# Altium footprint library Robert_.PcbLib: 95 footprints (part 2 of 6)
Each footprint in its own frame and in the unit in brackets; x right, y up, seen from the top. Pads: shape width x height; smd on the part's side, far side on the other; paste and mask are expansions set on the pad; w line width, h text height; cw(c..) or ccw(c..) is an arc to the next point about the centre after c.
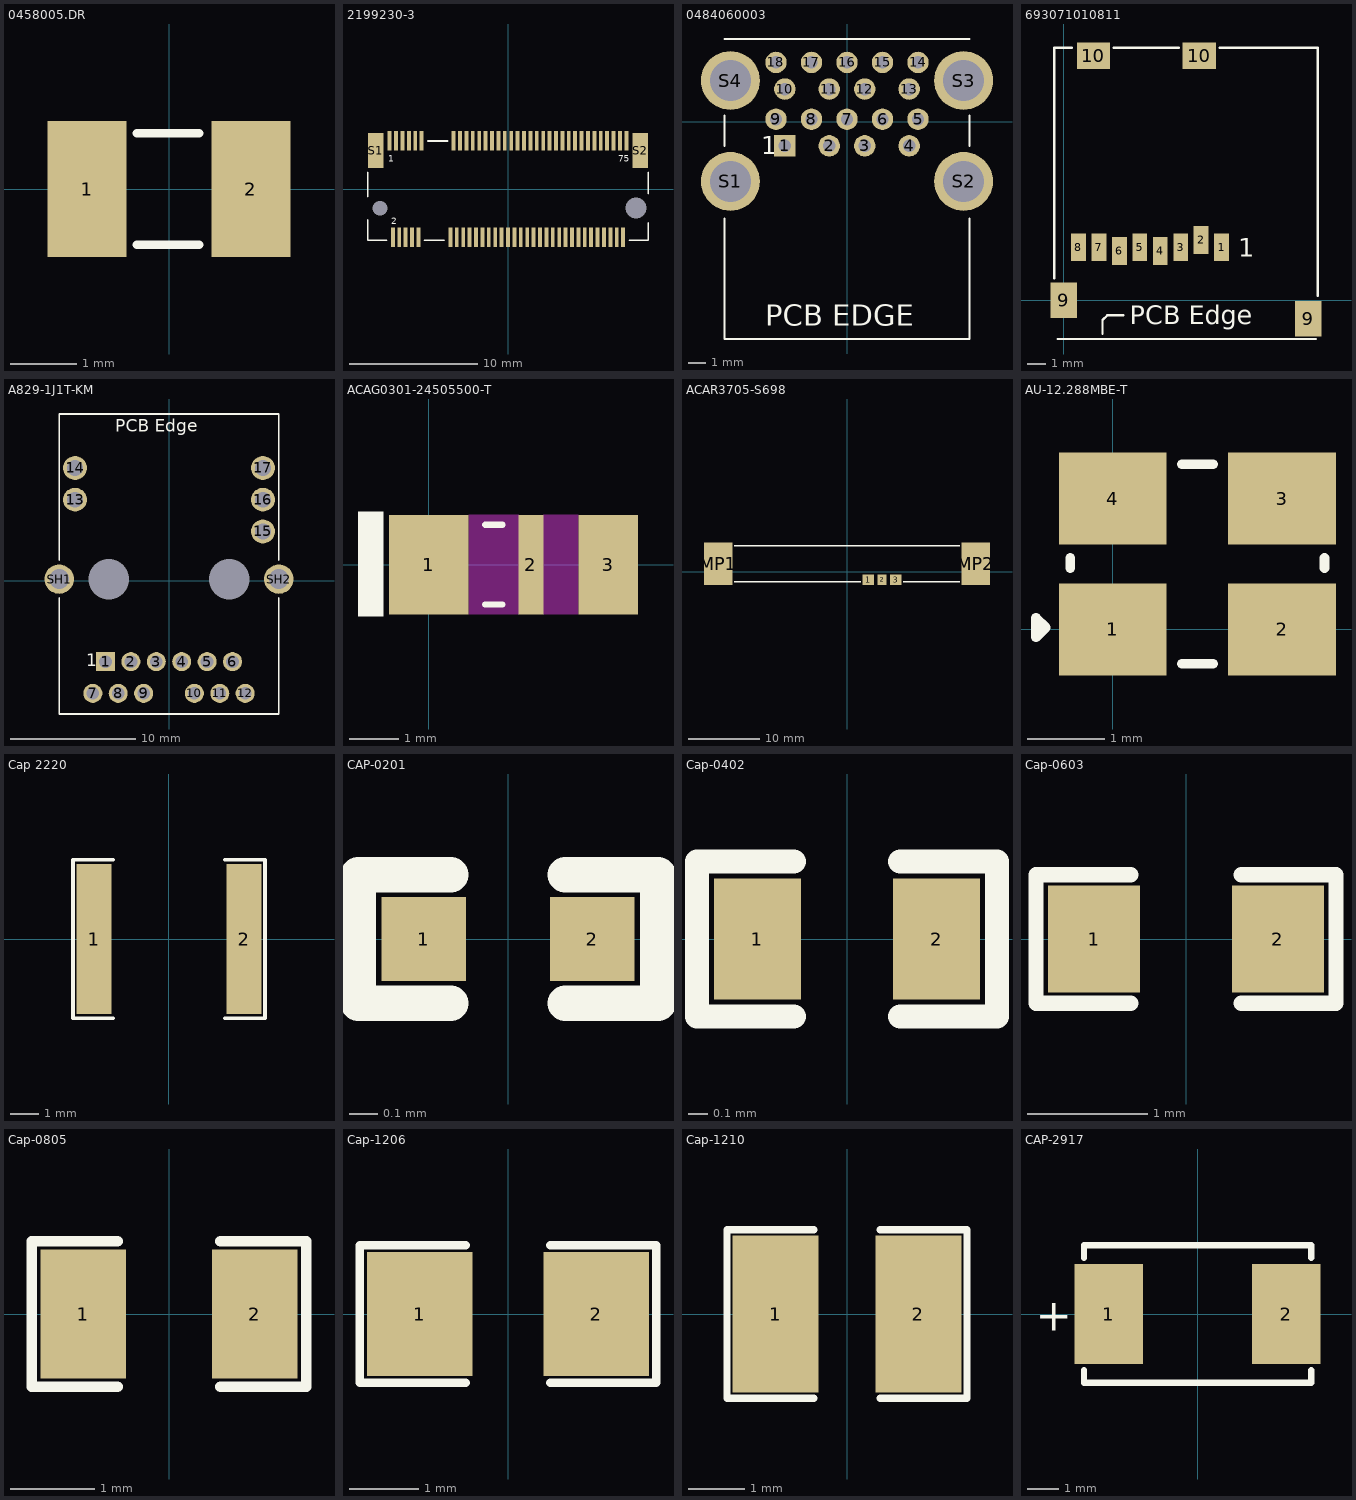
[diagram p1: the footprints below, top view; thin cyan lines are the x and y axes]

## 0458005.DR [mm]
pads (2):
  rect 1.185x2.05 smd: 1(-1.232,0) 2(1.232,0)
Top Overlay:
  lines w0.127: -0.483,-0.838 0.457,-0.838 ; -0.483,0.838 0.457,0.838
3D body "0458Series_LTF.step": height 1.58, standoff 0, extent -1.588,-0.787 1.588,0.787

## 2199230-3 [mm]
pads (71):
  rect 0.3x1.55 smd: 1(-9.25,3.775) 2(-9,-3.775) 3(-8.75,3.775) 4(-8.5,-3.775) 5(-8.25,3.775) 6(-8,-3.775) 7(-7.75,3.775) 8(-7.5,-3.775) 9(-7.25,3.775) 10(-7,-3.775) 11(-6.75,3.775) 20(-4.5,-3.775) 21(-4.25,3.775) 22(-4,-3.775) 23(-3.75,3.775) 24(-3.5,-3.775) 25(-3.25,3.775) 26(-3,-3.775) 27(-2.75,3.775) 28(-2.5,-3.775) 29(-2.25,3.775) 30(-2,-3.775) 31(-1.75,3.775) 32(-1.5,-3.775) 33(-1.25,3.775) 34(-1,-3.775) 35(-0.75,3.775) 36(-0.5,-3.775) 37(-0.25,3.775) 38(0,-3.775) 39(0.25,3.775) 40(0.5,-3.775) 41(0.75,3.775) 42(1,-3.775) 43(1.25,3.775) 44(1.5,-3.775) 45(1.75,3.775) 46(2,-3.775) 47(2.25,3.775) 48(2.5,-3.775) 49(2.75,3.775) 50(3,-3.775) 51(3.25,3.775) 52(3.5,-3.775) 53(3.75,3.775) 54(4,-3.775) 55(4.25,3.775) 56(4.5,-3.775) 57(4.75,3.775) 58(5,-3.775) 59(5.25,3.775) 60(5.5,-3.775) 61(5.75,3.775) 62(6,-3.775) 63(6.25,3.775) 64(6.5,-3.775) 65(6.75,3.775) 66(7,-3.775) 67(7.25,3.775) 68(7.5,-3.775) 69(7.75,3.775) 70(8,-3.775) 71(8.25,3.775) 72(8.5,-3.775) 73(8.75,3.775) 74(9,-3.775) 75(9.25,3.775)
  rect 1.2x2.75 smd: S1(-10.35,3) S2(10.35,3)
  round 0 hole 1.15 unplated: ""(-10,-1.5)
  round 0 hole 1.65 unplated: ""(10,-1.5)
Top Overlay:
  lines w0.127: -10.95,-2.395 -10.95,-4 -9.47,-4 ; -10.95,-0.605 -10.95,1.305 ; -6.53,-4 -4.97,-4 ; -6.28,3.75 -4.72,3.75 ; 9.47,-4 10.95,-4 10.95,-2.645 ; 10.95,-0.355 10.95,1.305
  text "75" at 8.611,2.134 h0.5
  text "2" at -9.119,-2.769 h0.5
  text "1" at -9.347,2.134 h0.5
3D body "2199230-3.stp": height 4.09, standoff -0.62, extent -10.95,-4.338 10.95,4.362

## 0484060003 [mm]
pads (22):
  rect 1.208x1.208 hole 0.7: 1(-3.5,-1.35)
  round 1.208 hole 0.7: 2(-1,-1.35) 3(1,-1.35) 4(3.5,-1.35) 5(4,0.15) 6(2,0.15) 7(0,0.15) 8(-2,0.15) 9(-4,0.15) 10(-3.5,1.85) 11(-1,1.85) 12(1,1.85) 13(3.5,1.85) 14(4,3.35) 15(2,3.35) 16(0,3.35) 17(-2,3.35) 18(-4,3.35)
  round 3.316 hole 2.3: S1(-6.57,-3.35) S2(6.57,-3.35) S3(6.57,2.33) S4(-6.57,2.33)
Top Overlay:
  lines w0.127: -6.9,-5.45 -6.9,-12.231 6.9,-12.231 6.9,-5.45 ; -6.9,-1.35 -6.9,0.35 ; -6.9,4.67 6.9,4.67 ; 6.9,-1.35 6.9,0.35
  text "1" at -4.828,-1.831 h1
  text "PCB EDGE" at -4.599,-11.471 h1.2
3D body "484060003.stp": height 16.2, standoff -3.2, extent -7.847,-12.794 7.823,4.666

## 693071010811 [mm]
pads (12):
  rect 0.8x1.5 smd: 1(8.49,2.85) 2(7.39,3.25) 3(6.29,2.85) 4(5.19,2.65) 5(4.09,2.85) 6(2.99,2.65) 7(1.89,2.85) 8(0.79,2.85)
  rect 1.4x1.9 smd: 9(0,0) 9(13.15,-1)
  rect 1.8x1.4 smd: 10(1.6,13.15) 10(7.3,13.15)
Top Overlay:
  lines w0.127: -0.508,1.194 -0.508,13.589 0.432,13.589 ; -0.33,-2.083 13.564,-2.083 ; 2.083,-1.803 2.083,-1.067 2.337,-0.813 3.2,-0.813 ; 2.692,13.589 6.198,13.589 ; 8.382,13.589 13.665,13.589 13.665,0.229
  text "1" at 9.373,2.337 h1
  text "PCB Edge" at 3.556,-1.292 h1
3D body "693071010811.stp": height 2.2, standoff 0, extent -0.464,-1.722 13.636,13.528

## A829-1J1T-KM [mil]
pads (21):
  rect 60x60 hole 40: 1(-200,-255)
  round 60 hole 40: 2(-120,-255) 3(-40,-255) 4(40,-255) 5(120,-255) 6(200,-255) 7(-240,-355) 8(-160,-355) 9(-80,-355) 10(80,-355) 11(160,-355) 12(240,-355)
  round 75 hole 50: 13(-296,255) 14(-296,355) 15(296,155) 16(296,255) 17(296,355)
  round 93 hole 62: SH1(-346,5) SH2(346,5)
  round 0 hole 128 unplated: ""(-190,5) ""(190,5)
Top Overlay:
  lines w5: -346,-54.45 -346,-420 346,-420 346,-54.45 ; -346,64.45 -346,525 346,525 346,64.45
  text "1" at -261,-269 h39.37
  text "PCB Edge" at -169,469.12 h39.37
3D body "A829-1J1T-KM--3DModel-STEP-56544.STEP": height 503.29, standoff -141.47, extent -401,-420.5 400.89,524.5

## ACAG0301-24505500-T [mm]
pads (3):
  rect 1.6x2 smd: 1(0,0)
  rect 0.5x2 smd: 2(2.05,0)
  rect 1.2x2 smd: 3(3.6,0)
Top Overlay:
  rectangle: -1.422,-1.041 -0.914,1.067
  lines w0.127: 1.13,-0.8 1.48,-0.8 ; 1.13,0.8 1.48,0.8
Keep-Out Layer:
  region: 3,-1 2.3,-1 2.3,1 3,1
  region: 1.8,-1 0.8,-1 0.8,1 1.8,1
3D body "step_temp.STEP": height 1.2, standoff 0, extent 0.3,-0.8 3.5,0.8

## ACAR3705-S698 [mm]
pads (5):
  rect 1.65x1.5 smd: 1(2.975,-1.125) 3(6.825,-1.125)
  rect 1.2x1.5 smd: 2(4.9,-1.125)
  rect 4x6 smd: MP1(-18,1.125) MP2(18,1.125)
Top Overlay:
  lines w0.2: -15.8,-1.375 1.9,-1.375 ; -15.8,3.625 15.8,3.625 ; 7.9,-1.375 15.8,-1.375
3D body "ACAR3705-S698.STEP": height 5, standoff 0, extent -18.5,-1.372 18.5,3.628

## AU-12.288MBE-T [mm]
pads (4):
  rect 1.4x1.2 smd: 1(0,0) 2(2.2,0) 3(2.2,1.7) 4(0,1.7)
Top Overlay:
  lines w0.127: -0.551,0.799 -0.551,0.926 ; 0.897,-0.445 1.303,-0.445 ; 0.897,2.145 1.303,2.145 ; 2.751,0.799 2.751,0.926 ; -0.995,-0.103 -0.868,0.024 -0.995,0.151 -0.995,-0.103
3D body "User Library-Crystal_ECX-32.STEP": height 0.82, standoff 0, extent -0.5,-0.4 2.7,2.1

## Cap 2220 [mm]
pads (2):
  rect 1.2x5.2 smd: 1(-2.6,0) 2(2.6,0)
Top Overlay:
  lines w0.127: -1.93,-2.749 -3.327,-2.749 -3.327,2.749 -1.93,2.749 ; 1.93,-2.749 3.327,-2.749 3.327,2.749 1.93,2.749
3D body "CAP2220.stp": height 2.24, standoff -0.04, extent -2.85,-2.5 2.85,2.5

## CAP-0201 [mm]
pads (2):
  rect 0.3x0.3 smd mask+0.055: 1(-0.3,0) 2(0.3,0)
Top Overlay:
  lines w0.127: -0.203,-0.229 -0.533,-0.229 -0.533,0.229 -0.203,0.229 ; 0.203,-0.229 0.533,-0.229 0.533,0.229 0.203,0.229
3D body "User Library-SMD Ceramic Capacitors_0201 (0603)_AB.STEP": height 0.28, standoff -0.02, extent -0.3,-0.15 0.301,0.15

## Cap-0402 [mil]
pads (2):
  rect 18x25 smd mask+2.36: 1(-18.5,0) 2(18.5,0)
Top Overlay:
  lines w5: -11,-16 -31,-16 -31,16 -11,16 ; 11,-16 31,-16 31,16 11,16
3D body "User Library-Capacitor 0402.step": height 18.5, standoff -1.18, extent -19.68,-9.84 19.7,9.85

## Cap-0603 [mil]
pads (2):
  rect 30x35 smd mask+2.36: 1(-30,0) 2(30,0)
Top Overlay:
  lines w5: -18,-21 -49,-21 -49,21 -18,21 ; 18,-21 49,-21 49,21 18,21
3D body "User Library-CAPC1608X09.step": height 34.25, standoff -1.18, extent -31.51,-15.75 31.49,15.74

## Cap-0805 [mil] "SMD 0805"
pads (2):
  rect 40x60 smd mask+2.76: 1(-40,0) 2(40,0)
Top Overlay:
  lines w5: -24,-34 -64,-34 -64,34 -24,34 ; 24,-34 64,-34 64,34 24,34
3D body "User Library-0805 SMD Capacitor.step": height 30, standoff -0.79, extent -39.36,-24.6 39.38,24.61

## Cap-1206 [mil] "SMD 1206"
pads (2):
  rect 60x70 smd: 1(-50,0) 2(50,0)
Top Overlay:
  lines w5: -24,-39 -84,-39 -84,39 -24,39 ; 24,-39 84,-39 84,39 24,39
3D body "User Library-1206 SMD Capacitor.step": height 39.45, standoff 0, extent -62.96,-31.46 63.03,31.53

## Cap-1210 [mil] "SMD 1210"
pads (2):
  rect 60x110 smd: 1(-50,0) 2(50,0)
Top Overlay:
  lines w5: -23,-59 -84,-59 -84,59 -23,59 ; 23,-59 84,-59 84,59 23,59
3D body "User Library-CAPC3225X10.step": height 39.37, standoff 0, extent -62.99,-49.21 63,49.22

## CAP-2917 [mm]
pads (2):
  rect 2.2x3.2 smd: 1(-2.85,0) 2(2.85,0)
Top Overlay:
  lines w0.203: -3.65,-1.806 -3.65,-2.21 3.65,-2.21 3.65,-1.808 ; -3.65,1.803 -3.65,2.21 3.65,2.21 3.65,1.805
  text "+" at -5.19,-0.533 h1.02
3D body "CAP_TAJ-D-2917-S_AVX.step": height 3.15, standoff 0, extent -3.746,-2.248 3.746,2.248